# Altium footprint library Connectors.PcbLib: 54 footprints (part 3 of 4)
Each footprint in its own frame and in the unit in brackets; x right, y up, seen from the top. Pads: shape width x height; smd on the part's side, far side on the other; paste and mask are expansions set on the pad; w line width, h text height; cw(c..) or ccw(c..) is an arc to the next point about the centre after c.
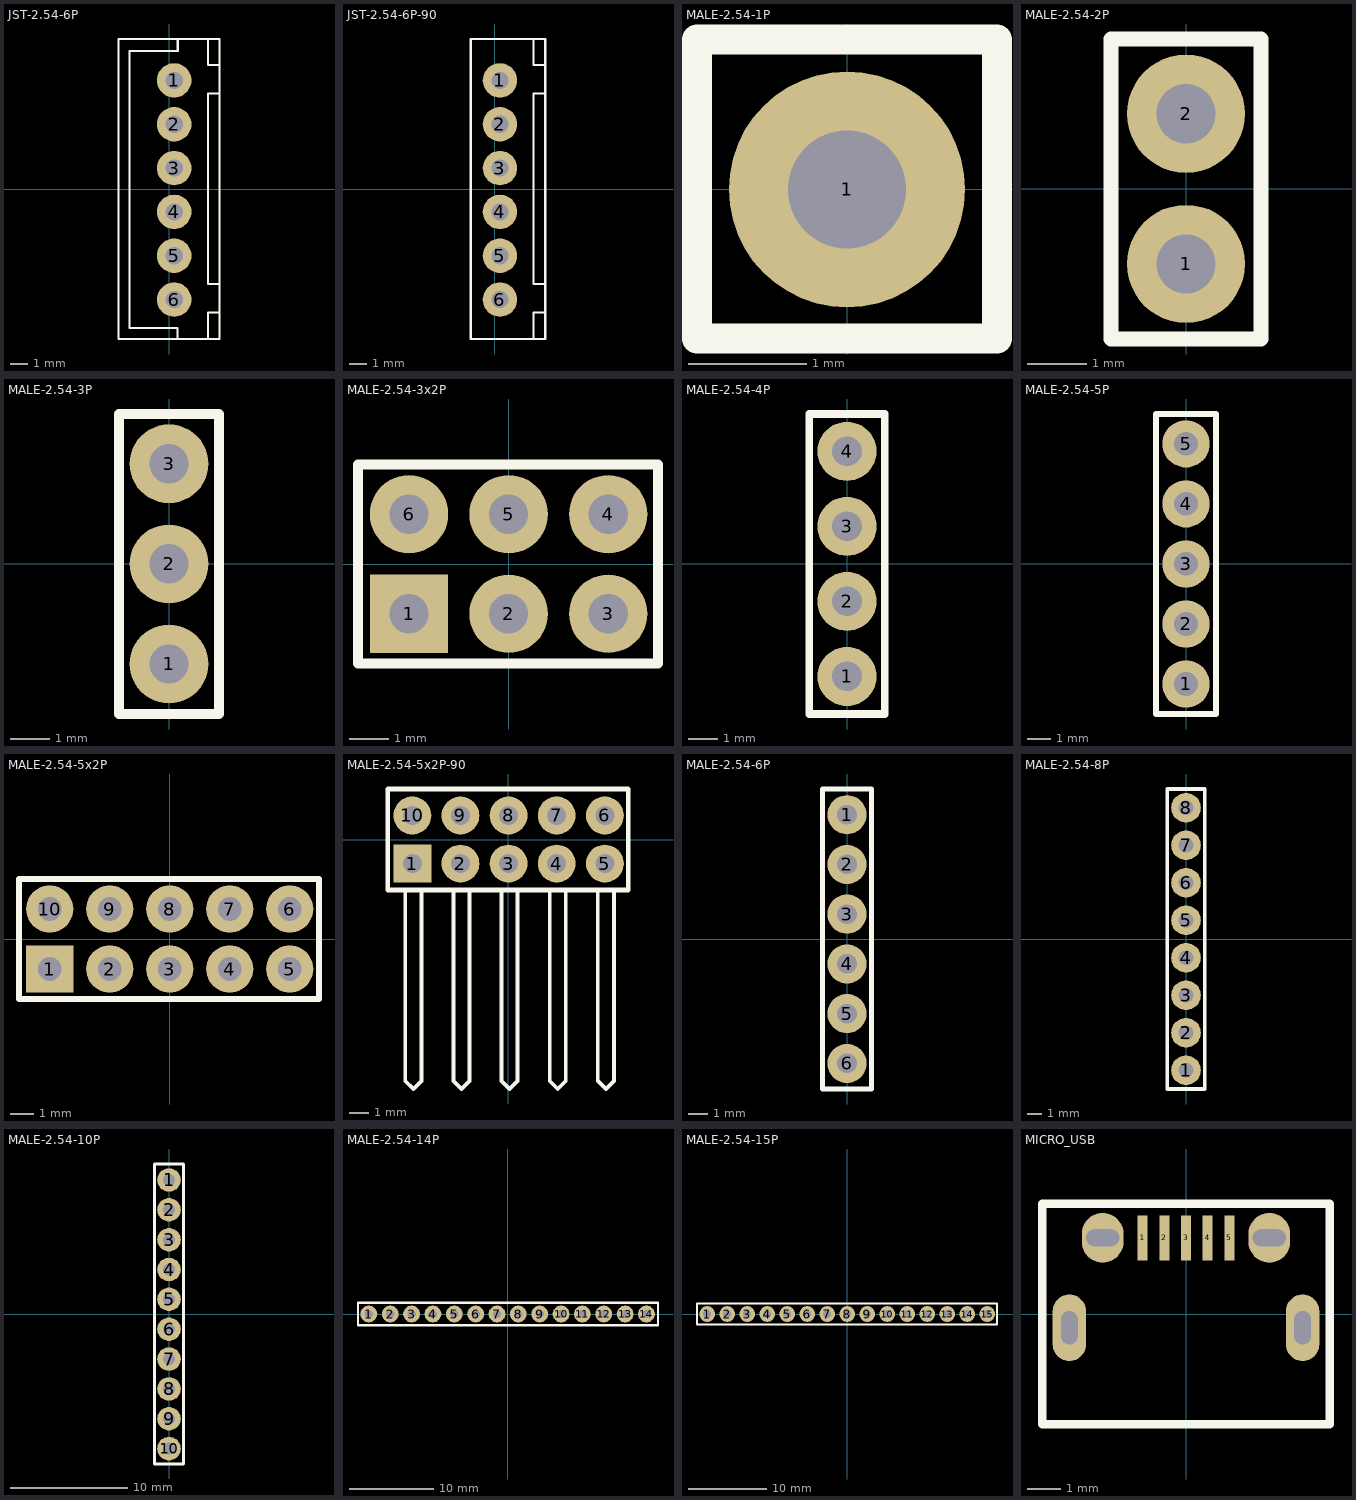
[diagram p2: the footprints below, top view; thin cyan lines are the x and y axes]

## JST-2.54-6P [mm]
pads (6):
  round 2 hole 1: 1(0.298,6.293) 2(0.298,3.753) 3(0.298,1.213) 4(0.298,-1.327) 5(0.298,-3.867) 6(0.298,-6.407)
Top Overlay:
  lines w0.12: 0.504,-8.683 0.504,-8.048 -2.29,-8.048 -2.29,8.007 0.508,8.007 0.508,8.642 ; 2.252,-8.659 2.252,-7.169 2.921,-7.169 ; 2.252,8.672 2.252,7.182 2.921,7.182 ; 2.921,-5.518 2.252,-5.518 2.252,5.531 2.921,5.531 ; -2.921,-8.693 2.921,-8.693 2.921,8.693 -2.921,8.693 -2.921,-8.693
3D body "JST-2.54-6P.step": height 7.23, standoff -2.98, extent -2.972,-8.731 2.87,8.643

## JST-2.54-6P-90 [mm]
pads (6):
  round 2 hole 1: 1(0.298,6.293) 2(0.298,3.753) 3(0.298,1.213) 4(0.298,-1.327) 5(0.298,-3.867) 6(0.298,-6.407)
Top Overlay:
  lines w0.12: 2.252,-8.659 2.252,-7.169 2.921,-7.169 ; 2.252,8.672 2.252,7.182 2.921,7.182 ; 2.921,-5.518 2.252,-5.518 2.252,5.531 2.921,5.531 ; -1.397,-8.693 -1.397,8.693 2.921,8.693 2.921,-8.693 -1.397,-8.693
3D body "JST-2.54-6P-90.stp": height 5.84, standoff -3.38, extent 0.005,-8.687 8.042,8.687

## MALE-2.54-1P [mm]
pads (1):
  round 2 hole 1: 1(0,0)
Top Overlay:
  lines w0.254: -1.27,-1.263 1.27,-1.263 1.27,1.27 -1.27,1.27 -1.27,-1.263
3D body "MALE-2.54-1P.STEP": height 8.3, standoff -2.8, extent -1.341,-1.192 1.199,1.208

## MALE-2.54-2P [mm]
pads (2):
  round 2 hole 1: 1(0,-1.27) 2(0,1.27)
Top Overlay:
  lines w0.254: -1.27,-2.54 1.27,-2.54 1.27,2.533 -1.27,2.533 -1.27,-2.54
3D body "MALE-2.54-2P.STEP": height 8.89, standoff -3.05, extent -1.333,-2.547 1.206,2.533

## MALE-2.54-3P [mm]
pads (3):
  round 2 hole 1: 1(0,-2.54) 2(0,0) 3(0,2.54)
Top Overlay:
  lines w0.254: -1.27,-3.81 1.27,-3.81 1.27,3.803 -1.27,3.803 -1.27,-3.81
3D body "MALE-2.54-3P.STEP": height 8.36, standoff -2.74, extent -1.193,-3.817 1.206,3.803

## MALE-2.54-3x2P [mm]
pads (6):
  rect 2x2 hole 1: 1(-2.54,-1.27)
  round 2 hole 1: 2(0,-1.27) 3(2.54,-1.27) 4(2.54,1.27) 5(0,1.27) 6(-2.54,1.27)
Top Overlay:
  lines w0.254: -3.841,-2.54 -3.841,2.54 3.81,2.54 3.81,-2.54 -3.841,-2.54
3D body "MALE-2.54-3X2P.STEP": height 10.54, standoff -3, extent -3.75,-2.54 3.75,2.545

## MALE-2.54-4P [mm]
pads (4):
  round 2 hole 1: 1(0,-3.81) 2(0,-1.27) 3(0,1.27) 4(0,3.81)
Top Overlay:
  lines w0.254: -1.27,-5.08 -1.27,5.073 1.27,5.073 1.27,-5.08 -1.27,-5.08
3D body "MALE-2.54-4P.STEP": height 8.36, standoff -2.74, extent -1.206,-5.087 1.193,5.073

## MALE-2.54-5P [mm]
pads (5):
  round 2 hole 1: 1(0,-5.08) 2(0,-2.54) 3(0,0) 4(0,2.54) 5(0,5.08)
Top Overlay:
  lines w0.254: -1.27,-6.35 1.27,-6.35 1.27,6.343 -1.27,6.343 -1.27,-6.35
3D body "MALE-2.54-5P.step": height 8.89, standoff -3.05, extent -1.333,-6.357 1.206,6.343

## MALE-2.54-5x2P [mm]
pads (10):
  rect 2x2 hole 1: 1(-5.08,-1.27)
  round 2 hole 1: 2(-2.54,-1.27) 3(0,-1.27) 4(2.54,-1.27) 5(5.08,-1.27) 6(5.08,1.27) 7(2.54,1.27) 8(0,1.27) 9(-2.54,1.27) 10(-5.08,1.27)
Top Overlay:
  lines w0.254: -6.381,-2.54 6.319,-2.54 6.319,2.54 -6.381,2.54 -6.381,-2.54
3D body "MALE-2.54-5x2P.step": height 8.11, standoff -3.14, extent -6.381,-2.41 6.319,2.41

## MALE-2.54-5x2P-90 [mm]
pads (10):
  rect 2x2 hole 1: 1(-5.049,-1.27)
  round 2 hole 1: 2(-2.509,-1.27) 3(0.031,-1.27) 4(2.571,-1.27) 5(5.111,-1.27) 6(5.111,1.27) 7(2.571,1.27) 8(0.031,1.27) 9(-2.509,1.27) 10(-5.049,1.27)
Top Overlay:
  lines w0.2: -5.419,-2.667 -5.419,-12.742 -4.995,-13.166 -4.572,-12.742 -4.572,-2.667 ; -2.879,-2.667 -2.879,-12.742 -2.455,-13.166 -2.032,-12.742 -2.032,-2.667 ; -0.339,-2.667 -0.339,-12.742 0.085,-13.166 0.508,-12.742 0.508,-2.667 ; 2.201,-2.667 2.201,-12.742 2.625,-13.166 3.048,-12.742 3.048,-2.667 ; 4.741,-2.667 4.741,-12.742 5.165,-13.166 5.588,-12.742 5.588,-2.667
  lines w0.254: -6.35,-2.667 -6.35,2.667 6.35,2.667 6.35,-2.667 -6.35,-2.667
3D body "MALE-2.54-5x2P_90.STEP": height 5, standoff -3, extent -6.355,-13.249 6.35,1.651

## MALE-2.54-6P [mm]
pads (6):
  round 2 hole 1: 1(0,6.35) 2(0,3.81) 3(0,1.27) 4(0,-1.27) 5(0,-3.81) 6(0,-6.35)
Top Overlay:
  lines w0.254: -1.25,-7.658 1.25,-7.658 1.25,7.662 -1.25,7.662 -1.25,-7.658
3D body "MALE-2.54-6P.STEP": height 8.36, standoff -2.74, extent -1.223,-7.658 1.177,7.582

## MALE-2.54-8P [mm]
pads (8):
  round 2 hole 1: 1(0,-8.89) 2(0,-6.35) 3(0,-3.81) 4(0,-1.27) 5(0,1.27) 6(0,3.81) 7(0,6.35) 8(0,8.89)
Top Overlay:
  lines w0.254: -1.27,-10.16 1.27,-10.16 1.27,10.16 -1.27,10.16 -1.27,-10.16
3D body "MALE-2.54-8P.STEP": height 8.36, standoff -2.74, extent -1.206,-10.167 1.193,10.153

## MALE-2.54-10P [mm]
pads (10):
  round 2 hole 1: 1(0,11.43) 2(0,8.89) 3(0,6.35) 4(0,3.81) 5(0,1.27) 6(0,-1.27) 7(0,-3.81) 8(0,-6.35) 9(0,-8.89) 10(0,-11.43)
Top Overlay:
  lines w0.254: -1.25,-12.738 -1.25,12.789 1.25,12.789 1.25,-12.738 -1.25,-12.738
3D body "MALE-2.54-10P.STEP": height 8.36, standoff -2.74, extent -1.242,-12.738 1.158,12.662

## MALE-2.54-14P [mm]
pads (14):
  round 2 hole 1 paste-2539.97 mask+0.051: 1(-16.51,0) 2(-13.97,0) 3(-11.43,0) 4(-8.89,0) 5(-6.35,0) 6(-3.81,0) 7(-1.27,0) 8(1.27,0) 9(3.81,0) 10(6.35,0) 11(8.89,0) 12(11.43,0) 13(13.97,0) 14(16.51,0)
Top Overlay:
  lines w0.254: -17.803,-1.33 17.884,-1.33 17.884,1.337 -17.803,1.337 -17.803,-1.33
3D body "MALE-2.54-14P.step": height 8.89, standoff -3.05, extent -17.78,-1.27 17.78,1.27

## MALE-2.54-15P [mm]
pads (15):
  round 2 hole 1 paste-2539.97 mask+0.051: 1(-17.78,0) 2(-15.24,0) 3(-12.7,0) 4(-10.16,0) 5(-7.62,0) 6(-5.08,0) 7(-2.54,0) 8(0,0) 9(2.54,0) 10(5.08,0) 11(7.62,0) 12(10.16,0) 13(12.7,0) 14(15.24,0) 15(17.78,0)
Top Overlay:
  lines w0.254: -19.073,-1.33 -19.073,1.337 19.027,1.337 19.027,-1.33 -19.073,-1.33
3D body "MALE-2.54-15P.step": height 8.89, standoff -3.05, extent -19.05,-1.27 19.05,1.27

## MICRO_USB [mm]
pads (9):
  rect 0.3x1.35 smd: 1(-1.3,2.286) 2(-0.65,2.286) 3(0,2.286) 4(0.65,2.286) 5(1.3,2.286)
  oval 1x2 hole 0.5 slot 1 at 90 deg: ""(-3.5,-0.414) ""(3.5,-0.414)
  oval 1.25x1.5 hole 0.5 slot 1 at 0 deg: ""(-2.5,2.286) ""(2.5,2.286)
Top Overlay:
  lines w0.254: -4.318,-3.302 -4.318,3.302 4.318,3.302 4.318,-3.302 -4.318,-3.302
3D body "USB Micro 2.stp": height 2.77, standoff -0.51, extent -4.025,-3.094 4.025,2.486